# Altium footprint library basicfootprints.PcbLib: 522 footprints (part 7 of 33)
Each footprint in its own frame and in the unit in brackets; x right, y up, seen from the top. Pads: shape width x height; smd on the part's side, far side on the other; paste and mask are expansions set on the pad; w line width, h text height; cw(c..) or ccw(c..) is an arc to the next point about the centre after c.
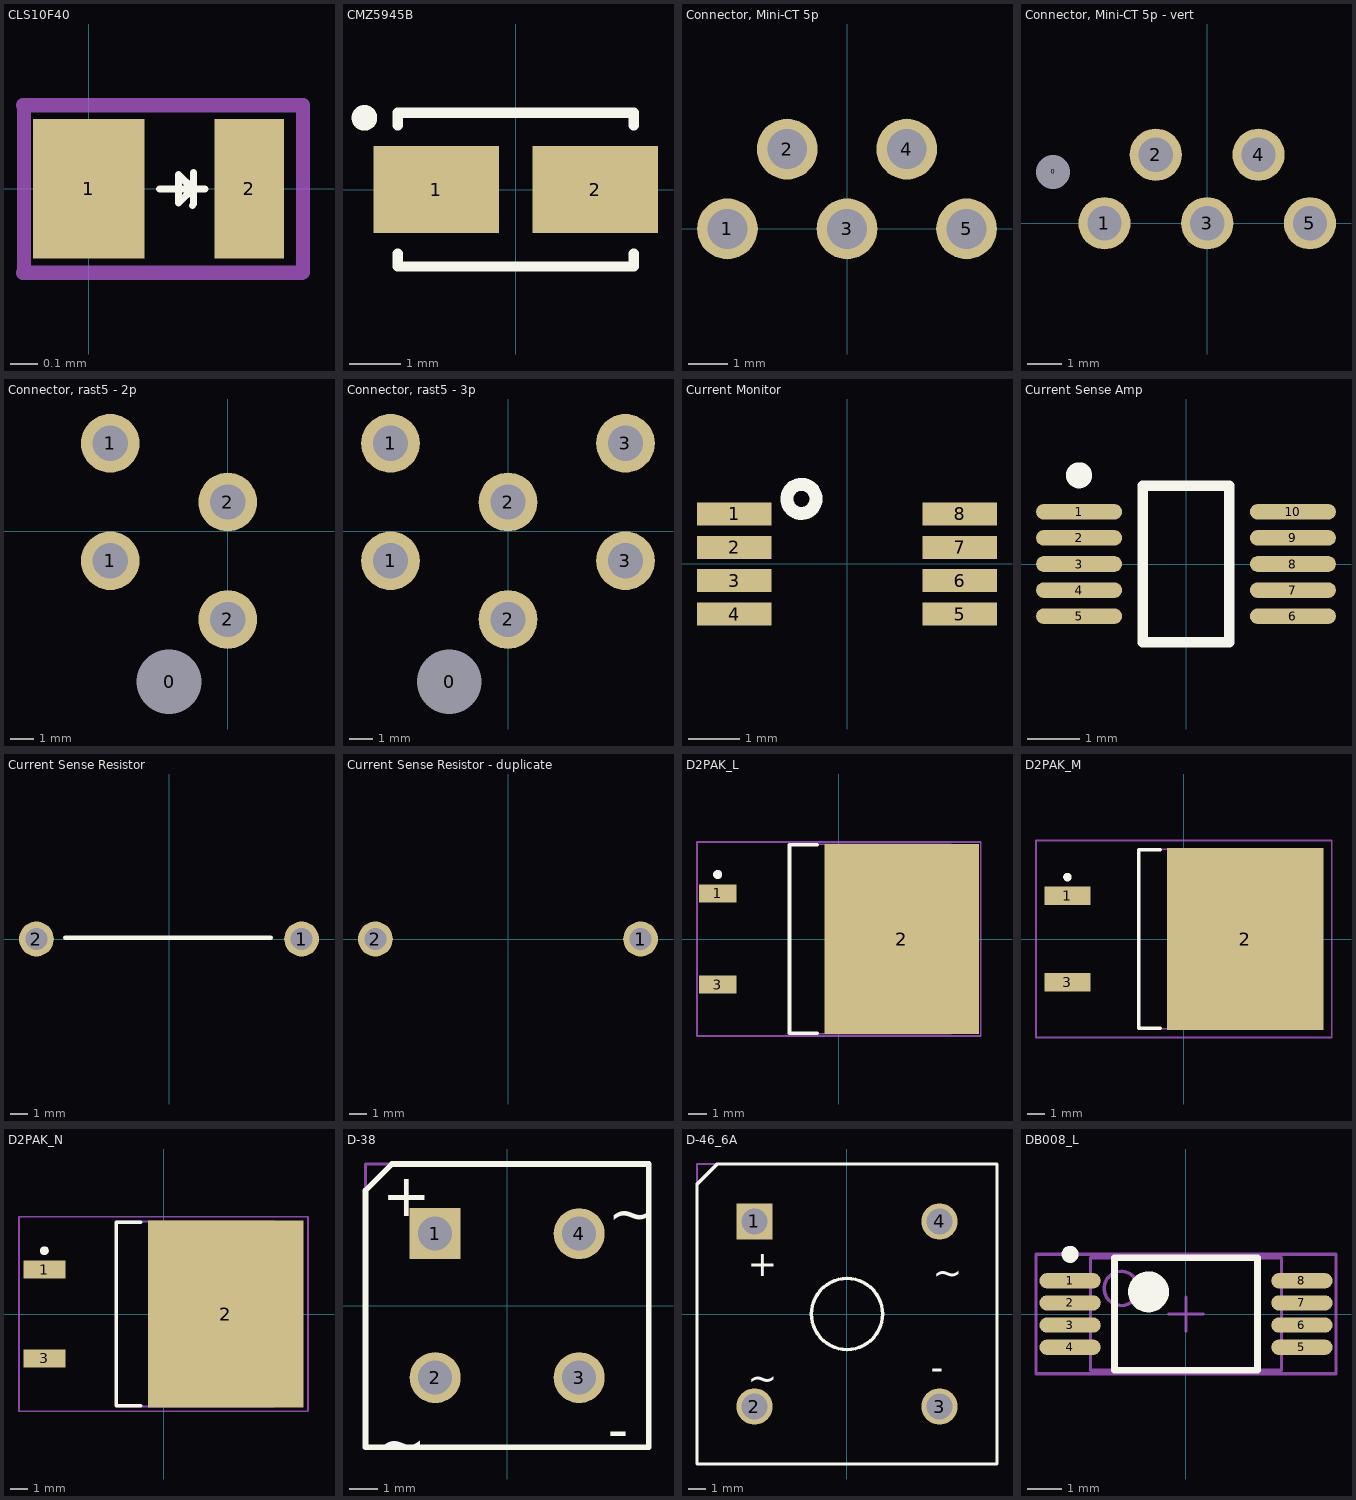
[diagram p6: the footprints below, top view; thin cyan lines are the x and y axes]

## CLS10F40 [mm] "Schottky Diode"
height 0.28
pads (2):
  rect 0.4x0.5 smd mask+0.051: 1(0,0)
  rect 0.25x0.5 smd mask+0.051: 2(0.575,0)
Top Overlay:
  lines w0.025: 0.254,0 0.417,0 ; 0.371,-0.059 0.376,-0.055 0.376,0.058 ; 0.373,-0.001 0.373,0 ; 0.373,0 0.322,0.051 0.322,-0.051 0.373,0
Mechanical 1:
  lines w0.051: -0.236,-0.301 0.764,-0.301 ; -0.236,0.3 0.764,0.3 ; -0.232,-0.3 -0.232,0.3 ; 0.768,-0.3 0.768,0.3
3D body: height 0.28, standoff 0, extent -0.232,-0.3 0.768,0.3

## CMZ5945B [mm] "68V Zener Diode"
height 2.62
pads (2):
  rect 2.45x1.7 smd: 1(-1.55,0) 2(1.55,0)
Top Overlay:
  circle w0.25: c-2.95,1.4 r0.125
  lines w0.2: -2.3,-1.25 -2.3,-1.5 2.3,-1.5 2.3,-1.25 ; -2.3,1.25 -2.3,1.5 2.3,1.5 2.3,1.25
3D body: height 2.62, standoff 0, extent -2.3,-1.46 2.3,1.46

## Connector, Mini-CT 5p [mm] "A98670-ND"
pads (5):
  round 1.524 hole 1: 1(-3,0) 2(-1.5,2) 3(0,0) 4(1.5,2) 5(3,0)
3D body "MiniCT-5.stp": height 5.45, standoff -2.45, extent -5.127,-6.096 4.873,2.354

## Connector, Mini-CT 5p - vert [mm] "A98684-ND"
pads (6):
  round 0.25 hole 1 unplated: 0(-4.5,1.5)
  round 1.524 hole 1: 1(-3,0) 2(-1.5,2) 3(0,0) 4(1.5,2) 5(3,0)
3D body "MiniCT-5-vert.stp": height 7, standoff -2.9, extent -5.047,-1.525 4.953,3.175

## Connector, rast5 - 2p [mm] "A115889-ND"
pads (5):
  round 1 hole 2.75 unplated: 0(-2.5,-6.4)
  round 2.5 hole 1.5: 1(-5,-1.25) 1(-5,3.75) 2(0,-3.75) 2(0,1.25)
3D body "RAST-2.stp": height 15, standoff -1.3, extent -8.563,-7.366 3.737,7.584

## Connector, rast5 - 3p [mm] "A115890-ND"
pads (7):
  round 1 hole 2.75 unplated: 0(-2.5,-6.4)
  round 2.5 hole 1.5: 1(-5,-1.25) 1(-5,3.75) 2(0,-3.75) 2(0,1.25) 3(5,-1.25) 3(5,3.75)
3D body "RAST-3.stp": height 15, standoff -1.3, extent -8.523,-7.457 8.777,7.493

## Current Monitor [mm] "INA202"
pads (8):
  rect 1.45x0.45 smd mask+0.05: 1(-2.2,0.975) 2(-2.2,0.325) 3(-2.2,-0.325) 4(-2.2,-0.975) 5(2.2,-0.975) 6(2.2,-0.325) 7(2.2,0.325) 8(2.2,0.975)
Top Overlay:
  circle w0.254: c-0.889,1.27 r0.284
3D body: height 1.1, standoff 0, extent -1.524,-1.524 1.524,1.524

## Current Sense Amp [mm] "MAX9922"
height 1.1
pads (10):
  oval 1.65x0.3 smd: 1(-2.05,1) 2(-2.05,0.5) 3(-2.05,0) 4(-2.05,-0.5) 5(-2.05,-1) 6(2.05,-1) 7(2.05,-0.5) 8(2.05,0) 9(2.05,0.5) 10(2.05,1)
Top Overlay:
  circle w0.25: c-2.05,1.7 r0.125
  lines w0.2: -0.825,-1.5 0.825,-1.5 0.825,1.5 -0.825,1.5 -0.825,-1.5
3D body: height 1.1, standoff 0.15, extent -1.525,-1.525 1.525,1.525

## Current Sense Resistor [mm] "Current Sense Resistor PWR4412-2SCR0050F"
height 22.4
pads (2):
  round 2 hole 1.25: 1(7.62,0) 2(-7.62,0)
Top Overlay:
  lines w0.254: -5.969,0.076 5.842,0.076
3D body: height 9.62, standoff 7.62, extent -8.788,-1.118 8.788,1.143
3D body: height 7.62, standoff 0, extent -8.788,-1.168 -6.502,1.143
3D body: height 7.62, standoff 0, extent 6.477,-1.156 8.763,1.156

## Current Sense Resistor - duplicate [mm] "Current Sense Resistor PWR4412-2SCR0050F"
height 22.4
pads (2):
  round 2 hole 1.25: 1(7.62,0) 2(-7.62,0)

## D2PAK_L [mm] "D2-PAK, 4-Leads, Body 8.8x10.4mm, Pitch 2.54mm, Lead Span 15.1mm, IPC High Density"
height 4.69
pads (3):
  rect 2.1x1 smd: 1(-6.75,2.54) 3(-6.75,-2.54)
  rect 8.6x10.6 smd: 2(3.5,0)
Top Overlay:
  circle w0.25: c-6.75,3.59 r0.125
  lines w0.2: -1.2,-5.25 -2.75,-5.25 -2.75,5.25 -1.2,5.25
Mechanical 13:
  lines w0.1: -2.75,-5.275 -2.75,5.275 6.25,5.275 6.25,-5.275 -2.75,-5.275
Mechanical 15:
  lines w0.1: -0.5,0 0.5,0 ; 0,-0.5 0,0.5 ; -7.9,-5.4 -7.9,5.4 7.9,5.4 7.9,-5.4 -7.9,-5.4
3D body: height 4.69, standoff 0, extent -2.75,-5.275 6.25,5.275

## D2PAK_M [mm] "D2-PAK, 4-Leads, Body 8.8x10.4mm, Pitch 2.54mm, Lead Span 15.1mm, IPC Low Density"
height 4.69
pads (3):
  rect 2.7x1.1 smd: 1(-6.85,2.54) 3(-6.85,-2.54)
  rect 9.2x10.7 smd: 2(3.6,0)
Top Overlay:
  circle w0.25: c-6.85,3.64 r0.125
  lines w0.2: -1.4,-5.25 -2.65,-5.25 -2.65,5.25 -1.4,5.25
Mechanical 13:
  lines w0.1: -2.65,-5.275 6.35,-5.275 6.35,5.275 -2.65,5.275 -2.65,-5.275
Mechanical 15:
  lines w0.1: -0.5,0 0.5,0 ; 0,-0.5 0,0.5 ; -8.7,-5.8 8.7,-5.8 8.7,5.8 -8.7,5.8 -8.7,-5.8
3D body: height 4.69, standoff 0, extent -2.65,-5.275 6.35,5.275

## D2PAK_N [mm] "D2-PAK, 4-Leads, Body 8.8x10.4mm, Pitch 2.54mm, Lead Span 15.1mm, IPC Medium Density"
height 4.69
pads (3):
  rect 2.4x1.05 smd: 1(-6.8,2.54) 3(-6.8,-2.54)
  rect 8.9x10.65 smd: 2(3.55,0)
Top Overlay:
  circle w0.25: c-6.8,3.615 r0.125
  lines w0.2: -1.3,-5.25 -2.7,-5.25 -2.7,5.25 -1.3,5.25
Mechanical 13:
  lines w0.1: -2.7,-5.275 -2.7,5.275 6.3,5.275 6.3,-5.275 -2.7,-5.275
Mechanical 15:
  lines w0.1: -0.5,0 0.5,0 ; 0,-0.5 0,0.5 ; -8.25,-5.55 -8.25,5.55 8.25,5.55 8.25,-5.55 -8.25,-5.55
3D body: height 4.69, standoff 0, extent -2.7,-5.275 6.3,5.275

## D-38 [mm] "Bridge Rectifier; 4 Terminals; Body 9.4 x 9.4 mm (typ); Pitch 5.08 mm"
height 9.91
pads (4):
  rect 1.8x1.8 hole 1.2: 1(-2.54,2.54)
  round 1.8 hole 1.2: 2(-2.54,-2.54) 3(2.54,-2.54) 4(2.54,2.54)
Top Overlay:
  lines w0.2: -5,-5 5,-5 5,5 -4.064,5 -5,4.064 -5,-5
  text "~" at 3.556,2.54 h1.5
  text "~" at -4.572,-5.588 h1.5
  text "-" at 3.556,-5.08 h1.5
  text "+" at -4.41,3.164 h1.5
Mechanical 13:
  lines w0.1: -5,-5 5,-5 5,5 -5,5 -5,-5
3D body: height 9.91, standoff 0, extent -5,-5 5,5

## D-46_6A [mm] "Bridge Rectifier; 4 Terminals; Body 16.8 x 16.8 mm (typ); Pitch 10.67 mm"
height 6.35
pads (4):
  rect 2.1x2.1 hole 1.5: 1(-5.335,5.335)
  round 2.1 hole 1.5: 2(-5.335,-5.335) 3(5.335,-5.335) 4(5.335,5.335)
Top Overlay:
  circle w0.2: c0,0 r2.05
  lines w0.2: -8.65,-8.65 8.65,-8.65 8.65,8.65 -7.474,8.65 -8.65,7.474 -8.65,-8.65
  text "~" at -5.723,-4.437 h1.5
  text "~" at 4.945,1.659 h1.5
  text "-" at 4.825,-3.809 h1.5
  text "+" at -5.723,2.167 h1.5
Mechanical 13:
  lines w0.1: -8.65,-8.65 -8.65,8.65 8.65,8.65 8.65,-8.65 -8.65,-8.65
3D body: height 6.35, standoff 0, extent -8.65,-8.65 8.65,8.65

## DB008_L [mm] "SOP, 8-Leads, Body 3x5.3mm, Pitch 0.65mm, IPC High Density"
height 2
pads (8):
  oval 1.8x0.45 smd: 1(-3.4,0.975) 2(-3.4,0.325) 3(-3.4,-0.325) 4(-3.4,-0.975) 5(3.4,-0.975) 6(3.4,-0.325) 7(3.4,0.325) 8(3.4,0.975)
Top Overlay:
  circle w0.25: c-3.4,1.75 r0.125
  circle w0.6: c-1.1,0.65 r0.3
  lines w0.2: -2.1,-1.65 -2.1,1.65 2.1,1.65 2.1,-1.65 -2.1,-1.65
Mechanical 13:
  circle w0.1: c-1.9,0.75 r0.5
  lines w0.1: -2.8,-1.65 -2.8,1.65 2.8,1.65 2.8,-1.65 -2.8,-1.65
Mechanical 15:
  lines w0.1: -0.5,0 0.5,0 ; 0,-0.5 0,0.5 ; -4.4,-1.75 -4.4,1.75 4.4,1.75 4.4,-1.75 -4.4,-1.75
3D body: height 2, standoff 0, extent -2.8,-1.65 2.8,1.65